# Altium footprint library Barometr.PcbLib: 1 footprints
Each footprint in its own frame and in the unit in brackets; x right, y up, seen from the top. Pads: shape width x height; smd on the part's side, far side on the other; paste and mask are expansions set on the pad; w line width, h text height; cw(c..) or ccw(c..) is an arc to the next point about the centre after c.
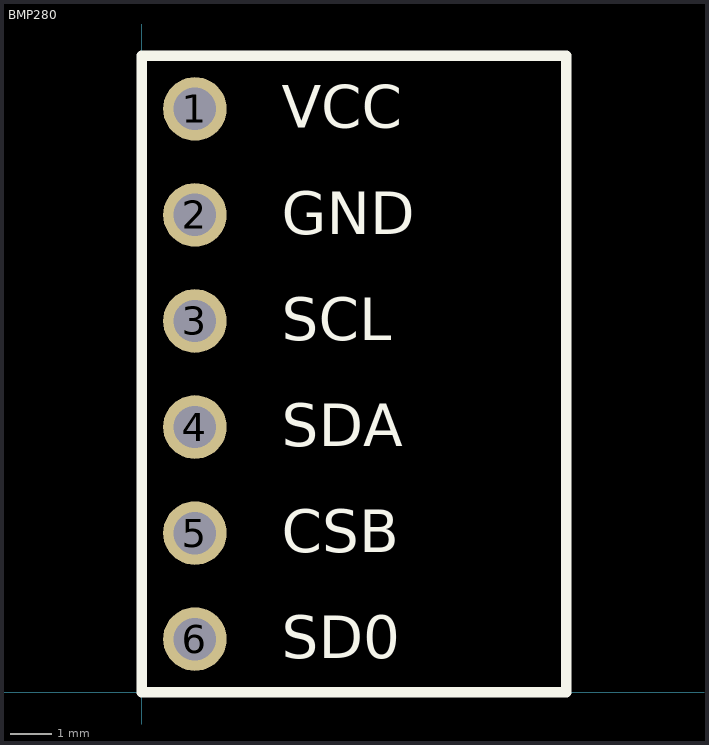
[diagram p0: the footprint, top view; thin cyan lines are the x and y axes]

## BMP280 [mil]
pads (6):
  round 60 hole 40: 1(50,550) 2(50,450) 3(50,350) 4(50,250) 5(50,150) 6(50,50)
Top Overlay:
  lines w10: 0,0 400,0 400,600 0,600 0,0
  text "VCC" at 132,532 h40
  text "GND" at 132,432 h40
  text "SCL" at 132,332 h40
  text "SDA" at 132,232 h40
  text "CSB" at 132,132 h40
  text "SD0" at 132,32 h40